# Altium footprint library LED-Optocupler$.PcbLib: 72 footprints (part 2 of 5)
Each footprint in its own frame and in the unit in brackets; x right, y up, seen from the top. Pads: shape width x height; smd on the part's side, far side on the other; paste and mask are expansions set on the pad; w line width, h text height; cw(c..) or ccw(c..) is an arc to the next point about the centre after c.
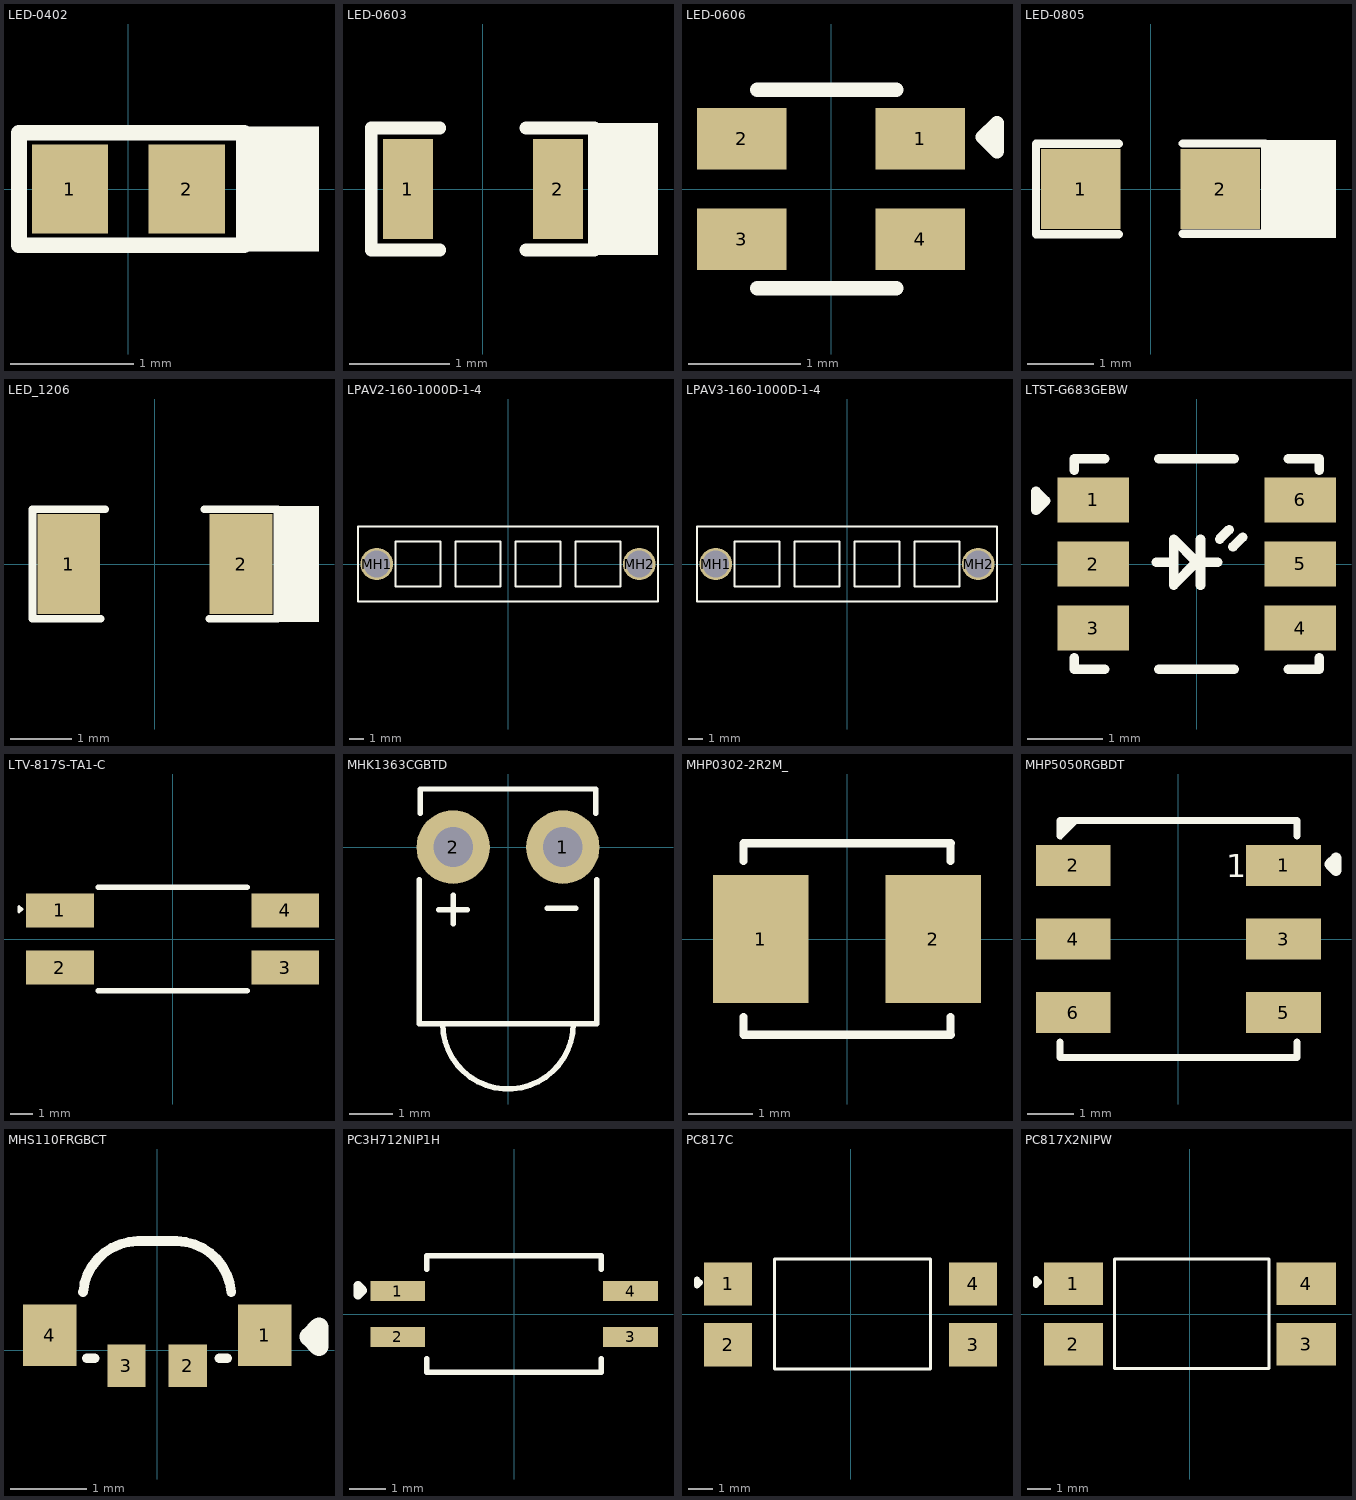
[diagram p1: the footprints below, top view; thin cyan lines are the x and y axes]

## LED-0402 [mm]
pads (2):
  rect 0.62x0.72 smd: 1(-0.475,0) 2(0.475,0)
Top Overlay:
  rectangle: 0.94,-0.508 1.549,0.508
  lines w0.127: -0.889,-0.457 0.94,-0.457 0.94,0.457 -0.889,0.457 -0.889,-0.457
3D body "User Library-LED-0402.step": height 0.45, standoff 0, extent -0.505,-0.25 0.505,0.25

## LED-0603 [mm]
pads (2):
  rect 0.5x1 smd: 1(-0.75,0) 2(0.75,0)
Top Overlay:
  rectangle: 1.118,-0.66 1.753,0.66
  lines w0.127: -0.432,-0.61 -1.118,-0.61 -1.118,0.61 -0.432,0.61 ; 0.432,-0.61 1.118,-0.61 1.118,0.61 0.432,0.61
3D body "User Library-LED SMD0603.step": height 0.68, standoff 0, extent -0.825,-0.369 0.825,0.356

## LED-0606 [mm]
pads (4):
  rect 0.8x0.55 smd: 1(0.8,0.45) 2(-0.8,0.45) 3(-0.8,-0.45) 4(0.8,-0.45)
Top Overlay:
  lines w0.127: -0.66,-0.889 0.584,-0.889 ; -0.66,0.889 0.584,0.889 ; 1.359,0.464 1.486,0.591 1.486,0.337 1.359,0.464
3D body "19-037A_RSGHBHW1-S03_2T.step": height 0.51, standoff 0, extent -0.787,-0.8 0.813,0.8

## LED-0805 [mm]
pads (2):
  rect 1.2x1.2 smd: 1(-1.05,0) 2(1.05,0)
Top Overlay:
  rectangle: 1.731,-0.737 2.794,0.737
  lines w0.127: -0.479,-0.681 -1.727,-0.681 -1.727,0.681 -0.479,0.681 ; 0.483,-0.677 1.731,-0.677 1.731,0.686 0.483,0.686
3D body "everlight-17-21-0805LED-YELLOW.STEP": height 1.1, standoff -0.01, extent -1,-0.625 1,0.625

## LED_1206 [mm]
pads (2):
  rect 1.02x1.62 smd: 1(-1.4,0) 2(1.4,0)
Top Overlay:
  rectangle: 1.991,-0.94 2.667,0.94
  lines w0.127: -0.884,-0.889 -1.991,-0.889 -1.991,0.889 -0.808,0.889 ; 0.808,0.889 1.991,0.889 1.991,-0.889 0.884,-0.889
3D body "everlight-ir26-71C-L447-TR8.step": height 2.5, standoff 0, extent -1.6,-0.65 1.6,0.65

## LPAV2-160-1000D-1-4 [mm]
pads (2):
  round 2.2 hole 1.8 unplated: MH1(-8.89,0) MH2(8.89,0)
Top Overlay:
  lines w0.127: -10.16,-2.54 -10.16,2.54 10.16,2.54 10.16,-2.54 -10.16,-2.54 ; -7.615,-1.525 -4.565,-1.525 -4.565,1.525 -7.615,1.525 -7.615,-1.525 ; -3.555,-1.525 -3.555,1.525 -0.505,1.525 -0.505,-1.525 -3.555,-1.525 ; 0.505,-1.525 0.505,1.525 3.555,1.525 3.555,-1.525 0.505,-1.525 ; 4.565,-1.525 4.565,1.525 7.615,1.525 7.615,-1.525 4.565,-1.525
3D body "LPAV2-160-1000D-1-4.stp": height 26.16, standoff -3.2, extent -10.146,-2.54 10.146,2.54

## LPAV3-160-1000D-1-4 [mm]
pads (2):
  round 2.2 hole 1.8 unplated: MH1(-8.89,0) MH2(8.89,0)
Top Overlay:
  lines w0.127: -10.16,-2.54 -10.16,2.54 10.16,2.54 10.16,-2.54 -10.16,-2.54 ; -7.615,-1.525 -4.565,-1.525 -4.565,1.525 -7.615,1.525 -7.615,-1.525 ; -3.555,-1.525 -3.555,1.525 -0.505,1.525 -0.505,-1.525 -3.555,-1.525 ; 0.505,-1.525 0.505,1.525 3.555,1.525 3.555,-1.525 0.505,-1.525 ; 4.565,-1.525 4.565,1.525 7.615,1.525 7.615,-1.525 4.565,-1.525
3D body "LPAV2-160-1000D-1-4.stp": height 26.16, standoff -3.2, extent -10.146,-2.54 10.146,2.54

## LTST-G683GEBW [mm]
pads (6):
  rect 0.95x0.6 smd: 1(-1.375,0.85) 2(-1.375,0) 3(-1.375,-0.85) 4(1.375,-0.85) 5(1.375,0) 6(1.375,0.85)
Top Overlay:
  lines w0.127: -1.626,-1.245 -1.626,-1.397 -1.219,-1.397 ; -1.626,1.245 -1.626,1.397 -1.219,1.397 ; -0.533,0.025 -0.305,0.025 ; -0.5,-1.4 0,-1.4 0.5,-1.4 ; -0.5,1.4 0,1.4 0.5,1.4 ; 0.051,-0.279 0.051,0.33 ; 0.051,0.025 0.279,0.025 ; 0.305,0.33 0.432,0.457 ; 0.483,0.229 0.61,0.356 ; 1.219,-1.397 1.626,-1.397 1.626,-1.245 ; 1.219,1.397 1.626,1.397 1.626,1.245 ; -2.134,0.711 -2.007,0.838 -2.134,0.965 -2.134,0.711 ; -0.305,-0.279 0,0.025 -0.305,0.33 -0.305,-0.279
3D body "LTST-G683GEBW.STEP": height 1.61, standoff -0.04, extent -1.75,-1.4 1.75,1.4

## LTV-817S-TA1-C [mm]
pads (4):
  rect 3x1.5 smd: 1(-5,1.27) 2(-5,-1.27) 3(5,-1.27) 4(5,1.27)
Top Overlay:
  lines w0.127: -6.819,1.194 -6.692,1.321 -6.819,1.448 -6.819,1.194
  lines w0.254: -3.3,-2.3 3.3,-2.3 ; -3.3,2.3 3.3,2.3
3D body "C109227.step": height 3.77, standoff 0, extent -5.1,-2.3 5.1,2.3

## MHK1363CGBTD [mm]
pads (2):
  round 1.7 hole 0.92: 1(1.27,0) 2(-1.27,0)
Top Overlay:
  lines w0.127: -2.057,-0.762 -2.057,-4.089 2.057,-4.089 2.057,-0.762 ; -2.032,0.787 -2.032,1.346 ; -2.007,1.346 2.032,1.346 2.032,0.787 ; -1.6,-1.448 -0.94,-1.448 ; -1.516,-4.089 ccw(c0,-4.089) 1.516,-4.089 ; -1.27,-1.778 -1.27,-1.118 ; 0.914,-1.422 1.575,-1.422
3D body "MHK1363CGBTD-1.STEP": height 6.36, standoff -3.5, extent -2,-6.762 2,1.288

## MHP0302-2R2M_ [mm]
pads (2):
  rect 1.5x2 smd: 1(-1.35,0) 2(1.35,0)
Top Overlay:
  lines w0.127: -1.624,-1.221 -1.624,-1.5 0,-1.5 1.626,-1.5 ; -1.624,1.221 -1.624,1.5 0,1.5 1.626,1.5 ; 1.624,-1.5 1.624,-1.221 ; 1.624,1.221 1.624,1.5
3D body "2201121700_Me-TECH-MHP0302-2R2M_C2934937.STEP": height 1.7, standoff -0.1, extent -1.7,-1.525 1.7,1.475

## MHP5050RGBDT [mm]
pads (6):
  rect 1.625x0.896 smd paste+0 mask+0.051: 1(2.288,1.6) 2(-2.288,1.6) 3(2.288,0) 4(-2.288,0) 5(2.288,-1.6) 6(-2.288,-1.6)
Top Overlay:
  region: -2.54,2.159 -2.54,2.202 -2.576,2.239
  region: -2.286,2.576 -2.576,2.576 -2.576,2.239 -2.497,2.239 -2.159,2.576
  lines w0.152: -2.576,-2.239 -2.576,-2.576 2.576,-2.576 2.576,-2.239 ; -2.576,2.238 -2.238,2.576 -2.202,2.576 ; -2.576,2.239 -2.576,2.576 2.576,2.576 2.576,2.239
  lines w0.25: 3.302,1.626 3.429,1.753 3.429,1.499 3.302,1.626
  text "1" at 1.041,1.346 h0.5
3D body "C409780.step": height 1.64, standoff 0, extent -2.65,-2.5 2.65,2.5

## MHS110FRGBCT [mm]
pads (4):
  rect 0.7x0.8 smd: 1(1.4,0.2) 4(-1.4,0.2)
  rect 0.5x0.55 smd: 2(0.4,-0.2) 3(-0.4,-0.2)
Top Overlay:
  lines w0.127: -0.965,0.762 cw(c-0.241,0.699) -0.254,1.425 0.254,1.425 cw(c0.241,0.699) 0.965,0.762 ; -0.914,-0.102 -0.813,-0.102 ; 0.813,-0.102 0.914,-0.102
  lines w0.25: 1.981,0.178 2.108,0.051 2.108,0.305 1.981,0.178
3D body "MHS110FRGBCT.STEP": height 1.01, standoff 0, extent -1.6,-0.052 1.6,1.441

## PC3H712NIP1H [mil]
pads (4):
  rect 60x22 smd: 1(-127.5,25) 2(-127.5,-25) 3(127.5,-25) 4(127.5,25)
Top Overlay:
  lines w6: -95.5,-48.95 -95.5,-64 95.5,-64 95.5,-48.95 ; -95.5,48.95 -95.5,64 95.5,64 95.5,48.95
  lines w9.84: -171,21 -171,31 -166,26 -171,21
3D body "SOIC_12NIP1H_SHP.step": height 87.09, standoff 0, extent -143.5,-59.02 143.5,59.02

## PC817C [mm]
pads (4):
  rect 2x1.8 smd paste+0 mask+0.051: 1(-5.1,1.27) 2(-5.1,-1.27) 3(5.1,-1.27) 4(5.1,1.27)
Top Overlay:
  lines w0.127: -3.175,-2.286 3.325,-2.286 3.325,2.314 -3.175,2.314 -3.175,-2.286
  lines w0.25: -6.401,1.194 -6.401,1.448 -6.274,1.321 -6.401,1.194
3D body "C2936043.step": height 4.64, standoff 0, extent -5.15,-2.3 5.15,2.3

## PC817X2NIPW [mm]
pads (4):
  rect 2.5x1.8 smd paste+0 mask+0.051: 1(-4.9,1.27) 2(-4.9,-1.27) 3(4.9,-1.27) 4(4.9,1.27)
Top Overlay:
  lines w0.127: -3.175,-2.286 3.325,-2.286 3.325,2.314 -3.175,2.314 -3.175,-2.286
  lines w0.25: -6.477,1.219 -6.35,1.346 -6.477,1.473 -6.477,1.219
3D body "PC817X2NIPW.step": height 3.6, standoff 0, extent -5,-2.3 5,2.3